# Altium schematic symbol library Clema_PB.SchLib: 1 symbol
Pins are listed as number, name and electrical type; pins without a type are passive.

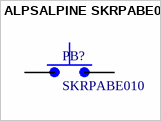
[diagram p0: symbol ALPSALPINE SKRPABE010]

## ALPSALPINE SKRPABE010
designator PB?, comment SKRPABE010
SWITCH TACTILE SPST SMD; Manufacturer: ALPSALPINE; Manufacturer Part Number: SKRPABE010; DigiKey Part Number: 4809-SKRPABE010TR-ND; LCSC Part Number: C115360; Mouser Part Number: 688-SKRPAB; Package: SMD-4P,4.2x3.2mm; Type: SMD
footprint ALPSALPINE SKRPABE010
pins: 1, 2 1, 3 2, 4 2